# Altium footprint library PcbLib1.PcbLib: 43 footprints (part 1 of 3)
Each footprint in its own frame and in the unit in brackets; x right, y up, seen from the top. Pads: shape width x height; smd on the part's side, far side on the other; paste and mask are expansions set on the pad; w line width, h text height; cw(c..) or ccw(c..) is an arc to the next point about the centre after c.
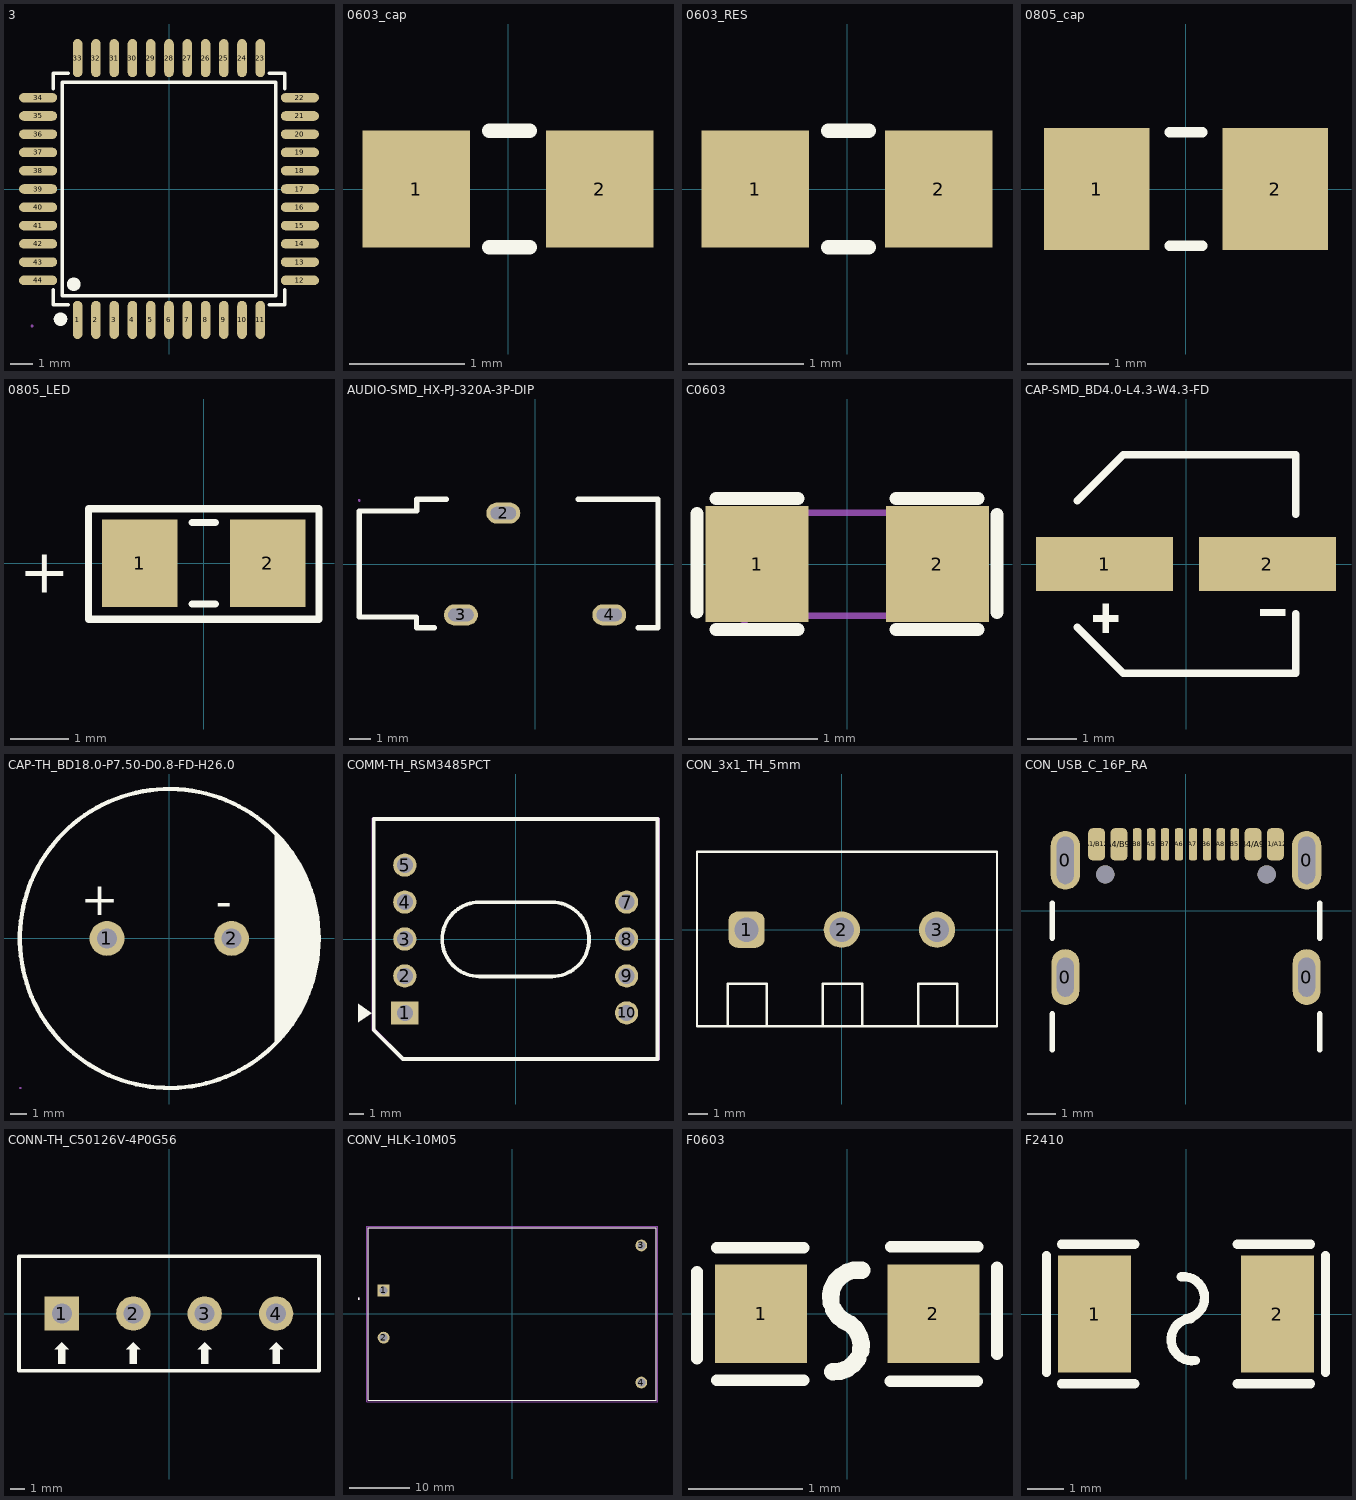
[diagram p0: the footprints below, top view; thin cyan lines are the x and y axes]

## 3 [mil]
pads (44):
  oval 16.5x65.7 smd: 1(-157.5,-225.8) 2(-126,-225.8) 3(-94.5,-225.8) 4(-63,-225.8) 5(-31.5,-225.8) 6(0,-225.8) 7(31.5,-225.8) 8(63,-225.8) 9(94.5,-225.8) 10(125.9,-225.8) 11(157.4,-225.8) 23(157.4,225.8) 24(125.9,225.8) 25(94.5,225.8) 26(63,225.8) 27(31.5,225.8) 28(0,225.8) 29(-31.5,225.8) 30(-63,225.8) 31(-94.5,225.8) 32(-126,225.8) 33(-157.5,225.8)
  oval 65.7x16.5 smd: 12(225.8,-157.5) 13(225.8,-126) 14(225.8,-94.5) 15(225.8,-63) 16(225.8,-31.5) 17(225.8,0) 18(225.8,31.5) 19(225.8,63) 20(225.8,94.5) 21(225.8,125.9) 22(225.8,157.4) 34(-225.8,157.4) 35(-225.8,125.9) 36(-225.8,94.5) 37(-225.8,63) 38(-225.8,31.5) 39(-225.8,0) 40(-225.8,-31.5) 41(-225.8,-63) 42(-225.8,-94.5) 43(-225.8,-126) 44(-225.8,-157.5)
Top Overlay:
  lines w6: -199.9,-173.3 -199.9,-199.9 -173.3,-199.9 ; -199.9,173.2 -199.9,199.8 -173.3,199.8 ; 173.2,-199.9 199.8,-199.9 199.8,-173.3 ; 173.2,199.8 199.8,199.8 199.8,173.2 ; -183.9,-183.9 183.9,-183.9 183.9,183.9 -183.9,183.9 -183.9,-183.9
  lines w11.8: -193,-224.4 -192.6,-222.4 -191.6,-220.6 -190,-219.3 -188.1,-218.6 -186,-218.6 -184.1,-219.3 -182.5,-220.6 -181.5,-222.4 -181.1,-224.4 -181.5,-226.5 -182.5,-228.2 -184.1,-229.6 -186,-230.3 -188.1,-230.3 -190,-229.6 -191.6,-228.2 -192.6,-226.5 -193,-224.4 ; -170.2,-164.3 -169.8,-162.2 -168.8,-160.5 -167.2,-159.1 -165.3,-158.4 -163.2,-158.4 -161.3,-159.1 -159.7,-160.5 -158.7,-162.2 -158.4,-164.3 -158.7,-166.3 -159.7,-168.1 -161.3,-169.4 -163.2,-170.1 -165.3,-170.1 -167.2,-169.4 -168.8,-168.1 -169.8,-166.3 -170.2,-164.3
Mechanical 8:
  region: -233.9,-236.3 -234.3,-237.5 -235.3,-238.4 -236.6,-238.6 -237.8,-238 -238.5,-236.9 -238.5,-235.6 -237.8,-234.5 -236.6,-233.9 -235.3,-234.1 -234.3,-235
3D body "LQFP-44_10x10mm_P0.8mm.step": height 59.06, standoff 0, extent -236.22,-236.22 236.22,236.22

## 0603_cap [mil]
pads (2):
  rect 37x40 smd: 1(-31.5,0) 2(31.5,0)
Top Overlay:
  lines w5: -6.5,-20 7.5,-20 ; -6.5,20 7.5,20
3D body "CircuitWorks-CAPACITOR 0603.STEP": height 34.36, standoff 0.5, extent -31.5,-16.93 31.5,16.93

## 0603_RES [mil]
pads (2):
  rect 37x40 smd: 1(-31.5,0) 2(31.5,0)
Top Overlay:
  lines w5: -6.5,-20 7.5,-20 ; -6.5,20 7.5,20
3D body "C0603.step": height 11.89, standoff 0, extent -31.5,-15.75 31.5,15.75

## 0805_cap [mm]
pads (2):
  rect 1.3x1.5 smd: 1(-1.1,0) 2(1.1,0)
Top Overlay:
  lines w0.127: -0.2,-0.7 0.2,-0.7 ; -0.2,0.7 0.2,0.7
3D body: height 1, standoff 0, extent -1.125,-0.7 1.075,0.7

## 0805_LED [mm]
pads (2):
  rect 1.3x1.5 smd: 1(-1.1,0) 2(1.1,0)
Top Overlay:
  lines w0.127: -0.2,-0.7 0.2,-0.7 ; -0.2,0.7 0.2,0.7 ; -1.981,-0.965 -1.981,0.94 1.981,0.94 1.981,-0.965 -1.981,-0.965
  text "+" at -3.175,-0.508 h0.76
3D body: height 0.5, standoff 0, extent -1,-0.625 1,0.625
3D body: height 1.1, standoff 0.5, extent -0.7,-0.625 0.7,0.625

## AUDIO-SMD_HX-PJ-320A-3P-DIP [mil]
pads (3):
  oval 63x39.4 hole 23.6 slot 47.2 at 0 deg: 2(-59,94.5) 3(-137.8,-94.5) 4(137.8,-94.5)
Top Overlay:
  lines w10: -220.4,98.4 -326.7,98.4 -326.7,-98.4 -220.4,-98.4 -220.4,-118.1 -186.9,-118.1 ; -219.9,98.4 -219.9,120 -165,120 ; 80,120 228.4,120 228.4,-118.1 191.9,-118.1
Mechanical 8:
  region: -324.4,118.1 -324.8,116.8 -325.8,116 -327.1,115.8 -328.3,116.3 -329,117.5 -329,118.8 -328.3,119.9 -327.1,120.5 -325.8,120.3 -324.8,119.4
3D body "Jack_3.5mm_PJ320A_3P_Horizontal.step": height 196.85, standoff -96.31, extent -337.6,-123.11 219.49,113.11

## C0603 [mil]
pads (2):
  rect 31.5x35.4 smd: 1(-27.5,0) 2(27.6,0)
Top Overlay:
  lines w4: -45.86,-14.7 -45.86,15.41 ; -40,-20 -15,-20 ; -40,20 -15,20 ; 15,-20 40,-20 ; 15,20 40,20 ; 45.82,-14.88 45.82,15.12
Mechanical 6:
  lines w2: -31.5,-15.8 31.5,-15.8 31.5,15.7 -31.5,15.7 -31.5,-15.8
Mechanical 8:
  region: -29.1,-15.8 -29.5,-17.1 -30.5,-17.9 -31.8,-18.1 -33,-17.6 -33.7,-16.5 -33.7,-15.1 -33,-14 -31.8,-13.5 -30.5,-13.6 -29.5,-14.5
Mechanical 9:
  region: 31.5,-15.8 31.5,15.7 19.7,15.7 19.7,-15.8
  region: -31.5,-15.8 -31.5,15.7 -19.7,15.7 -19.7,-15.8

## CAP-SMD_BD4.0-L4.3-W4.3-FD [mm]
pads (2):
  rect 2.799x1.1 smd: 1(-1.661,0) 2(1.661,0)
Top Overlay:
  region: -1.701,-0.808 -1.701,-1.405 -1.572,-1.405 -1.572,-0.808
  region: 2.029,-0.925 2.029,-1.052 1.514,-1.052 1.514,-0.925
  region: -1.894,-1.047 -1.894,-1.174 -1.379,-1.174 -1.379,-1.047
  lines w0.152: -2.217,-1.288 -1.28,-2.225 2.235,-2.225 2.235,-1.016 ; -2.217,1.29 -1.28,2.228 2.235,2.228 2.235,1.016

## CAP-TH_BD18.0-P7.50-D0.8-FD-H26.0 [mm]
pads (2):
  round 2.101 hole 1.199 paste-2539.97 mask+0.051: 1(-3.752,0) 2(3.749,0)
Top Overlay:
  drawing of 134 lines, arcs and shapes, not listed
  text "+" at -5.334,1.397 h2
  text "-" at 2.794,1.27 h2
Mechanical 8:
  region: -8.918,-9.004 -8.928,-9.037 -8.954,-9.06 -8.987,-9.065 -9.017,-9.05 -9.035,-9.022 -9.035,-8.989 -9.017,-8.961 -8.987,-8.946 -8.954,-8.951 -8.928,-8.974
3D body: height 16, standoff 0, extent -9.127,-9 8.873,9

## COMM-TH_RSM3485PCT [mil]
pads (9):
  rect 74.8x63 hole 43.3: 1(-300,-200)
  round 63 hole 43.3: 2(-300,-100) 3(-300,0) 4(-300,100) 5(-300,200) 7(300,100) 8(300,0) 9(300,-100) 10(300,-200)
Top Overlay:
  region: -389.7,-200.8 -426.6,-175.5 -426.6,-225.5
  lines w10: 98.5,99.6 107.2,99.2 115.9,98 124.4,96.1 132.7,93.4 140.8,90.1 148.5,86 155.9,81.3 162.8,76 169.2,70 175.1,63.6 180.5,56.6 185.1,49.3 189.2,41.5 192.5,33.4 195.1,25.1 197,16.6 198.1,7.9 198.5,-0.8 198.1,-9.6 197,-18.2 195.1,-26.8 192.5,-35.1 189.2,-43.2 185.1,-50.9 180.4,-58.3 175.1,-65.3 169.2,-71.7 162.8,-77.6 155.9,-83 148.5,-87.7 140.8,-91.7 132.7,-95.1 124.4,-97.7 115.8,-99.6 107.2,-100.8 98.4,-101.2 -98.4,-101.2 -107.1,-100.9 -115.8,-99.7 -124.4,-97.8 -132.7,-95.2 -140.8,-91.8 -148.6,-87.8 -156,-83.1 -162.9,-77.8 -169.4,-71.8 -175.3,-65.4 -180.6,-58.4 -185.3,-51 -189.4,-43.3 -192.7,-35.2 -195.4,-26.8 -197.3,-18.3 -198.4,-9.6 -198.8,-0.8 -198.4,7.9 -197.3,16.6 -195.4,25.1 -192.7,33.5 -189.4,41.6 -185.4,49.4 -180.6,56.7 -175.3,63.7 -169.4,70.2 -162.9,76.1 -156,81.4 -148.6,86.1 -140.8,90.2 -132.7,93.5 -124.4,96.1 -115.8,98 -107.2,99.2 -98.4,99.6 102.4,99.6 ; -383.8,-246.1 -305.1,-324.8 383.9,-324.8 383.9,324.8 -383.8,324.8 -383.8,-246.1
Mechanical 1:
  lines w10: -385,-245 -385,325 385,325 385,-325 -305,-325 -385,-245
3D body: height 0, standoff 0, extent 301.48,-200.79 301.48,-200.79
3D body: height 0, standoff 0, extent 301.48,-100.79 301.48,-100.79
3D body: height 0, standoff 0, extent 301.48,-0.79 301.48,-0.79
3D body: height 0, standoff 0, extent 301.48,99.21 301.48,99.21
3D body: height 0, standoff 0, extent -298.52,199.21 -298.52,199.21
3D body: height 0, standoff 0, extent -298.52,-200.79 -298.52,-200.79
3D body: height 0, standoff 0, extent -298.52,-100.79 -298.52,-100.79
3D body: height 0, standoff 0, extent -298.52,99.21 -298.52,99.21
3D body: height 0, standoff 0, extent -298.52,-0.79 -298.52,-0.79
3D body: height 279.53, standoff 10, extent -385,-325 385,325

## CON_3x1_TH_5mm [mm]
height 12
pads (3):
  rrect50% 1.9x1.9 hole 1.27: 1(-5,0)
  round 1.9 hole 1.27: 2(0,0) 3(5,0)
Top Overlay:
  lines w0.127: -5.99,-5.08 -5.99,-2.83 -3.93,-2.83 -3.93,-5.08 ; -0.99,-5.08 -0.99,-2.83 1.07,-2.83 1.07,-5.077 ; 4.01,-5.08 4.01,-2.83 6.07,-2.83 6.07,-5.08 ; -7.603,-5.08 -7.603,4.102 8.148,4.102 8.148,-5.08 -7.603,-5.08
3D body "pxc_1935174_03_PT-1-5-3-5-0-H_3D.stp": height 11.7, standoff -3.2, extent -7.507,-4.988 8.063,4.012

## CON_USB_C_16P_RA [mm]
pads (18):
  oval 1x2 hole 0.6 slot 1.4 at 90 deg: 0(-4.32,-2.377) 0(4.32,-2.377)
  oval 1.05x2.1 hole 0.6 slot 1.7 at 90 deg: 0(-4.32,1.803) 0(4.32,1.803)
  rrect50% 0.6x1.15 smd: A1/B12(-3.2,2.378) A4/B9(-2.4,2.378) B1/A12(3.2,2.378) B4/A9(2.4,2.378)
  rrect50% 0.3x1.15 smd: A5(-1.25,2.378) A6(-0.25,2.378) A7(0.25,2.378) A8(1.25,2.378) B5(1.75,2.378) B6(0.75,2.378) B7(-0.75,2.378) B8(-1.75,2.378)
  round 0.65 hole 0.65 unplated: ""(-2.89,1.303) ""(2.89,1.303)
Top Overlay:
  lines w0.2: -4.79,-4.977 -4.79,-3.697 ; -4.79,-0.977 -4.79,0.273 ; 4.79,-4.977 4.79,-3.697 ; 4.79,-0.977 4.79,0.273
3D body "step_temp.STEP": height 3.31, standoff -0.85, extent -4.79,-4.977 4.79,2.733

## CONN-TH_C50126V-4P0G56 [mil]
pads (4):
  rect 94.5x94.5 hole 55.1 paste-99999 mask+2: 1(-295.3,0)
  round 94.5 hole 55.1 paste-99999 mask+2: 2(-98.4,0) 3(98.4,0) 4(295.3,0)
Top Overlay:
  region: -305.1,-98.4 -285.4,-98.4 -285.4,-137.8 -305.1,-137.8
  region: -295.3,-78.7 -315,-98.4 -275.6,-98.4
  region: -98.4,-78.7 -118.1,-98.4 -78.8,-98.4
  region: -108.3,-98.4 -88.6,-98.4 -88.6,-137.8 -108.3,-137.8
  region: 98.4,-78.7 78.7,-98.4 118.1,-98.4
  region: 88.6,-98.4 108.3,-98.4 108.3,-137.8 88.6,-137.8
  region: 295.3,-78.7 275.6,-98.4 314.9,-98.4
  region: 285.4,-98.4 305.1,-98.4 305.1,-137.8 285.4,-137.8
  lines w10: -413.4,-157.4 -413.4,157.5 413.4,157.5 413.4,-157.4 -413.4,-157.4
Mechanical 8:
  region: -391.4,-157.4 -391.7,-158.7 -392.7,-159.6 -394.1,-159.8 -395.3,-159.2 -396,-158.1 -396,-156.8 -395.3,-155.7 -394.1,-155.1 -392.7,-155.3 -391.7,-156.2

## CONV_HLK-10M05 [mm]
height 22
pads (4):
  rect 1.95x1.95 / inner round 1.95 / far side rect 1.95x1.95 hole 1.3: 1(-21.25,3.9)
  round 1.95 hole 1.3: 2(-21.25,-3.9) 3(21.25,11.3) 4(21.25,-11.3)
Top Overlay:
  circle w0.2: c-25.37,2.5 r0.1
  lines w0.127: -23.75,-14.25 23.75,-14.25 23.75,14.25 -23.75,14.25 -23.75,-14.25
Mechanical 13:
  circle w0.2: c-25.37,2.5 r0.1
  lines w0.127: -23.75,-14.25 23.75,-14.25 23.75,14.25 -23.75,14.25 -23.75,-14.25
Mechanical 15:
  lines w0.05: -24,-14.5 -24,14.5 24,14.5 24,-14.5 -24,-14.5
3D body "step_temp.STEP": height 22, standoff -5, extent -23.75,-14.25 23.75,14.25

## F0603 [mil]
pads (2):
  rect 31.8x34 smd paste-3937: 1(-29.7,0) 2(29.7,0)
Top Overlay:
  lines w4: -51.81,-15.56 -51.81,14.44 ; -45,-22.94 -15,-22.94 ; -45,22.75 -15,22.75 ; -5.6,3.7 -4.7,1.3 ; 3.7,-15.4 4.6,-12.9 ; 14.81,-23.31 44.81,-23.31 ; 15.02,23.05 45.02,23.05 ; 51.62,-14.06 51.62,15.94
  lines w6: -5.6,3.7 -5.7,6.3 -5.2,8.8 -4,11.1 -2.2,12.9 -0.1,14.3 2.4,15 5,15 ; -5,-20 -2.4,-19.9 0,-19 2.1,-17.4 3.7,-15.4 ; -4.7,1.3 -3.2,-0.9 -1.2,-2.5 1.1,-3.7 3,-5.5 4.2,-7.8 4.8,-10.3 4.6,-12.9
Top Paste:
  region: 12.4,-5.4 12.4,5.4 23.2,17 43,17 45.5,14.5 45.5,-14.5 43,-17 23.2,-17
  region: -12.4,-5.4 -12.4,5.4 -23.2,17 -43,17 -45.5,14.5 -45.5,-14.5 -43,-17 -23.2,-17
3D body "742792602.stp": height 32, standoff 0.5, extent -31.5,-15.75 31.49,15.75

## F2410 [mil]
pads (2):
  rect 78.7x126 smd: 1(-98.4,0) 2(98.4,0)
Top Overlay:
  lines w10: -150,-63 -150,63 ; -133.9,-75 -55.1,-75 ; -133.9,75 -55.1,75 ; -5,40 -0.8,40 3.3,39.3 7.2,37.9 10.7,35.7 13.8,33 16.4,29.7 18.3,26 19.5,22 20,17.9 19.7,13.8 18.6,9.7 16.8,6 14.4,2.6 11.4,-0.3 7.9,-2.5 4.1,-4.1 0,-5 ; 5,-5 1,-5.7 -2.8,-7 -6.3,-9 -9.4,-11.6 -12,-14.7 -14,-18.2 -15.3,-22.1 -15.9,-26.1 -15.8,-30.1 -15,-34.1 -13.6,-37.8 -11.4,-41.2 -8.7,-44.2 -5.5,-46.7 -1.9,-48.6 2,-49.8 6,-50.2 10,-50 ; 55.1,-75 133.9,-75 ; 55.1,75 133.9,75 ; 150,-63 150,63
Mechanical 8:
  region: -117.7,-51.2 -118.1,-52.5 -119.1,-53.3 -120.4,-53.5 -121.6,-53 -122.3,-51.8 -122.3,-50.5 -121.6,-49.4 -120.4,-48.8 -119.1,-49 -118.1,-49.9
3D body: height 85.04, standoff -23.34, extent -115,-50 125,50